# Altium schematic symbol library 1757268.SchLib: 1 symbol
Pins are listed as number, name and electrical type; pins without a type are passive.

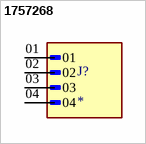
[diagram p0: symbol 1757268]

## 1757268
designator J?
Pluggable Header 5.08mm 12AWG 320V 12A 4 Position COMBICON MSTBA Series | Phoenix Contact 1757268; SnapEDA_Link: https://www.snapeda.com/parts/1757268/Phoenix+Contact/view-part/?ref=snap; Package: None; Value: *; MF: Phoenix Contact; MP: 1757268; Check_prices: https://www.snapeda.com/parts/1757268/Phoenix+Contact/view-part/?ref=eda
footprint PHOENIX_1757268
pins: 01, 02, 03, 04